# Altium integrated library 0603ESDA2-TR2.IntLib: 1 symbol
Pins are listed as number, name and electrical type; pins without a type are passive.

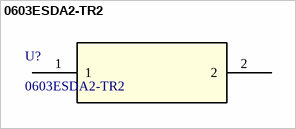
[diagram p0: symbol 0603ESDA2-TR2]

## 0603ESDA2-TR2
designator U?
No Description Available; Manufacturer_Name: Eaton; Copyright: Copyright (C) 2026 Ultra Librarian. All rights reserved.; Manufacturer_Part_Number: 0603ESDA2-TR2; RefDes: RefDes; Type: Type
footprint CHIP_2-TR2_EAT
pins: 1, 2